# Altium footprint library WR-FPC_0.50mm.PcbLib: 147 footprints (part 7 of 10)
Each footprint in its own frame and in the unit in brackets; x right, y up, seen from the top. Pads: shape width x height; smd on the part's side, far side on the other; paste and mask are expansions set on the pad; w line width, h text height; cw(c..) or ccw(c..) is an arc to the next point about the centre after c.
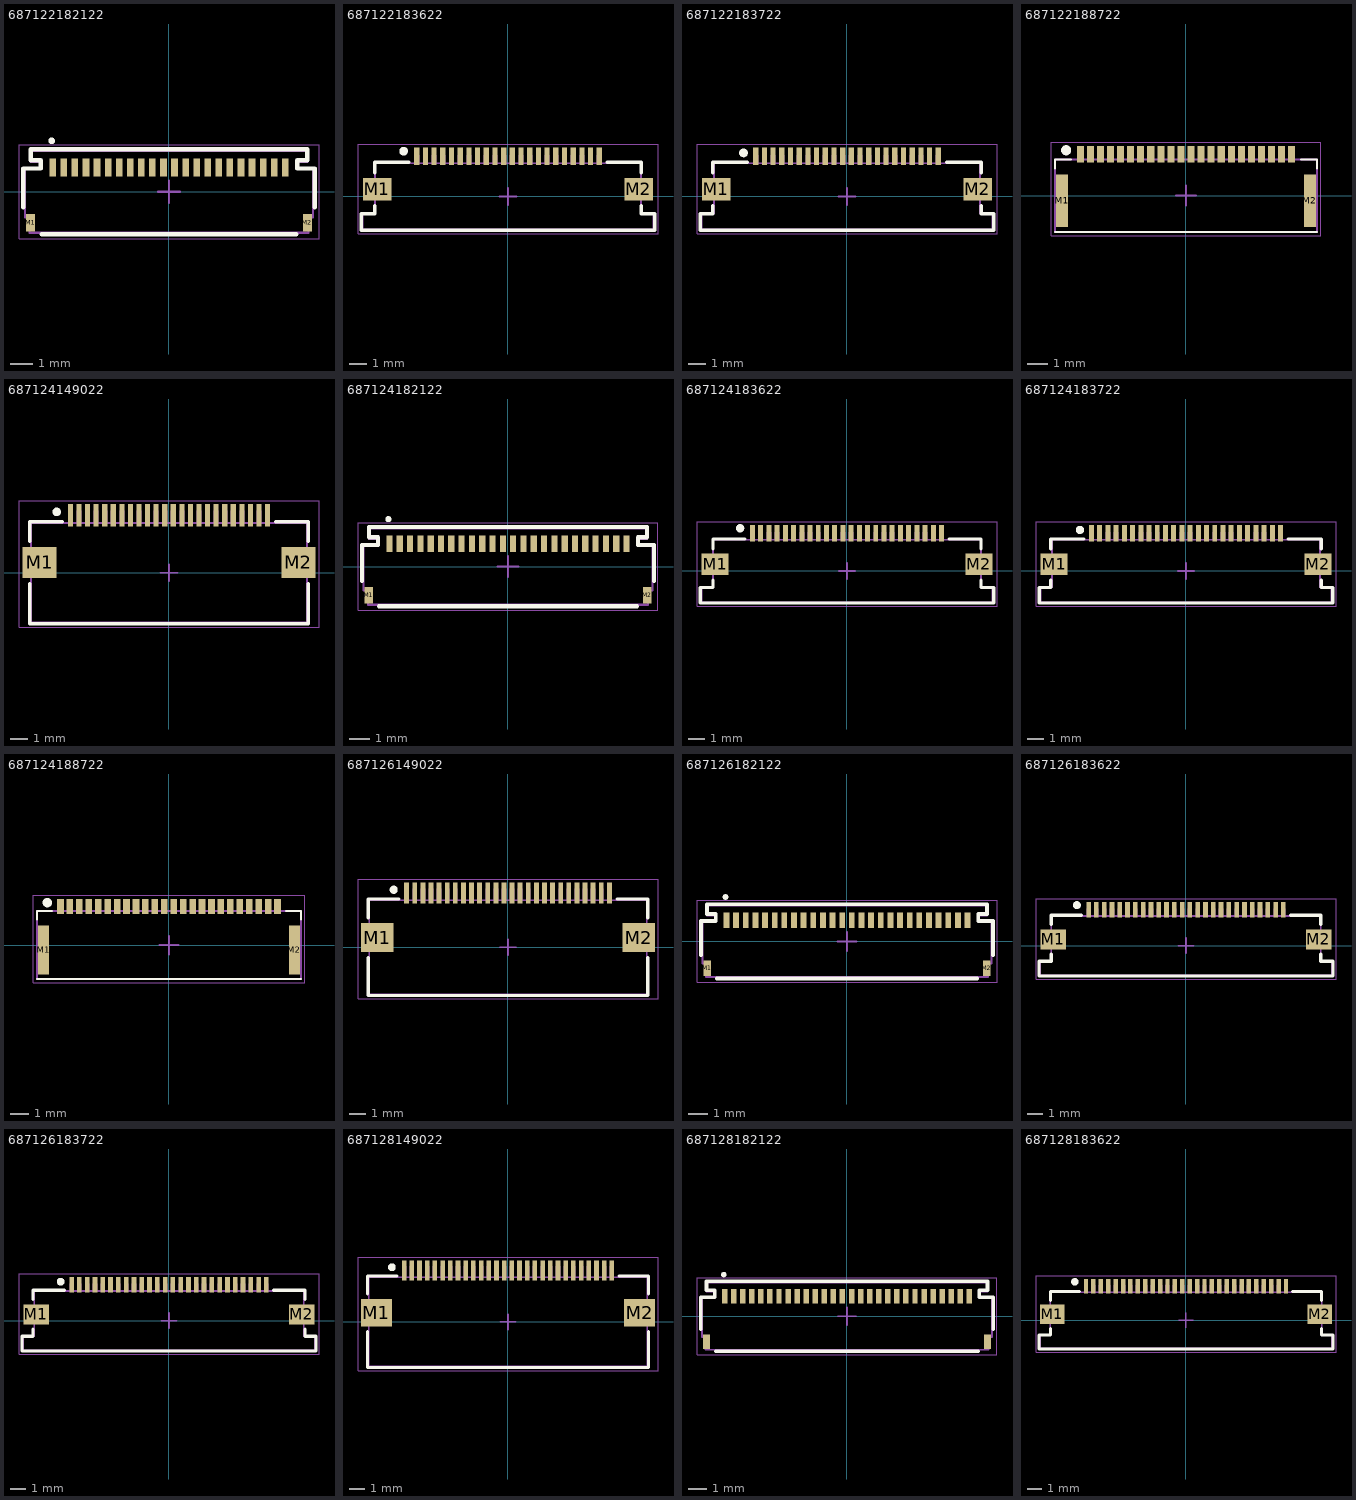
[diagram p6: the footprints below, top view; thin cyan lines are the x and y axes]

## 687122182122 [mm] "ZIF Connectors, Horizontal, Dual Contact Back Locking, pitch 0.5mm, 22p"
height 1.06
pads (24):
  rect 0.3x0.8 smd: 1(-5.25,1.1) 2(-4.75,1.1) 3(-4.25,1.1) 4(-3.75,1.1) 5(-3.25,1.1) 6(-2.75,1.1) 7(-2.25,1.1) 8(-1.75,1.1) 9(-1.25,1.1) 10(-0.75,1.1) 11(-0.25,1.1) 12(0.25,1.1) 13(0.75,1.1) 14(1.25,1.1) 15(1.75,1.1) 16(2.25,1.1) 17(2.75,1.1) 18(3.25,1.1) 19(3.75,1.1) 20(4.25,1.1) 21(4.75,1.1) 22(5.25,1.1)
  rect 0.4x0.8 smd: M1(-6.25,-1.4) M2(6.25,-1.4)
Top Overlay:
  circle w0.15: c-5.3,2.3 r0.075
  lines w0.2: -6.575,-0.7 -6.575,1.05 -5.8,1.05 -5.8,1.425 -6.25,1.425 -6.25,1.925 6.25,1.925 6.25,1.425 5.8,1.425 5.8,1.05 6.575,1.05 6.575,-0.7 ; -5.75,-1.925 5.75,-1.925
Top Assembly:
  lines w0.1: -6.5,-1.15 -6.5,1.05 -5.8,1.05 -5.8,1.35 -6.25,1.35 -6.25,1.85 6.25,1.85 6.25,1.35 5.8,1.35 5.8,1.05 6.5,1.05 6.5,-1.15 6.3,-1.15 6.3,-1.85 -6.3,-1.85 -6.3,-1.15 -6.5,-1.15
Top Designator:
  text ".Designator" at -3.647,-0.357 h1
Top 3D Body:
  lines w0.1: -6.5,-1.15 -6.3,-1.15 -6.3,-1.85 6.3,-1.85 6.3,-1.15 6.5,-1.15 6.5,1.05 5.8,1.05 5.8,1.35 6.25,1.35 6.25,1.85 -6.25,1.85 -6.25,1.35 -5.8,1.35 -5.8,1.05 -6.5,1.05 -6.5,-1.15
Top Courtyard:
  lines w0.05: -6.775,-2.125 -6.775,2.125 6.775,2.125 6.775,-2.125 -6.775,-2.125
Top Component Center:
  lines w0.1: -0.5,0 0.5,0 ; 0,-0.5 0,0.5
3D body "687122182122.stp": height 0.98, standoff -0.01, extent -6.5,-1.85 6.5,1.85

## 687122183622 [mm] "ZIF Connectors, Horizontal, Top Contact Low Profile, pitch 0.5mm, 22p"
height 1.3
pads (24):
  rect 0.3x1 smd: 1(-5.25,2.3) 2(-4.75,2.3) 3(-4.25,2.3) 4(-3.75,2.3) 5(-3.25,2.3) 6(-2.75,2.3) 7(-2.25,2.3) 8(-1.75,2.3) 9(-1.25,2.3) 10(-0.75,2.3) 11(-0.25,2.3) 12(0.25,2.3) 13(0.75,2.3) 14(1.25,2.3) 15(1.75,2.3) 16(2.25,2.3) 17(2.75,2.3) 18(3.25,2.3) 19(3.75,2.3) 20(4.25,2.3) 21(4.75,2.3) 22(5.25,2.3)
  rect 1.65x1.3 smd: M1(-7.525,0.4) M2(7.525,0.4)
Top Overlay:
  circle w0.25: c-6,2.6 r0.125
  lines w0.2: -7.65,-0.55 -7.65,-1 -8.425,-1 -8.425,-1.95 8.425,-1.95 8.425,-1 7.65,-1 7.65,-0.55 ; -7.65,1.35 -7.65,1.95 -5.7,1.95 ; 5.7,1.95 7.65,1.95 7.65,1.35
Top Assembly:
  lines w0.1: -5.35,1.9 -5.35,2.35 -5.15,2.35 -5.15,1.9 ; -4.85,1.9 -4.85,2.35 -4.65,2.35 -4.65,1.9 ; -4.35,1.9 -4.35,2.35 -4.15,2.35 -4.15,1.9 ; -3.85,1.9 -3.85,2.35 -3.65,2.35 -3.65,1.9 ; -3.35,1.9 -3.35,2.35 -3.15,2.35 -3.15,1.9 ; -2.85,1.9 -2.85,2.35 -2.65,2.35 -2.65,1.9 ; -2.35,1.9 -2.35,2.35 -2.15,2.35 -2.15,1.9 ; -1.85,1.9 -1.85,2.35 -1.65,2.35 -1.65,1.9 ; -1.35,1.9 -1.35,2.35 -1.15,2.35 -1.15,1.9 ; -0.85,1.9 -0.85,2.35 -0.65,2.35 -0.65,1.9 ; -0.35,1.9 -0.35,2.35 -0.15,2.35 -0.15,1.9 ; 0.15,1.9 0.15,2.35 0.35,2.35 0.35,1.9 ; 0.65,1.9 0.65,2.35 0.85,2.35 0.85,1.9 ; 1.15,1.9 1.15,2.35 1.35,2.35 1.35,1.9 ; 1.65,1.9 1.65,2.35 1.85,2.35 1.85,1.9 ; 2.15,1.9 2.15,2.35 2.35,2.35 2.35,1.9 ; 2.65,1.9 2.65,2.35 2.85,2.35 2.85,1.9 ; 3.15,1.9 3.15,2.35 3.35,2.35 3.35,1.9 ; 3.65,1.9 3.65,2.35 3.85,2.35 3.85,1.9 ; 4.15,1.9 4.15,2.35 4.35,2.35 4.35,1.9 ; 4.65,1.9 4.65,2.35 4.85,2.35 4.85,1.9 ; 5.15,1.9 5.15,2.35 5.35,2.35 5.35,1.9 ; -8.35,-1.9 8.35,-1.9 8.35,-1 7.65,-1 7.65,1.9 -7.65,1.9 -7.65,-1 -8.35,-1 -8.35,-1.9
Top Designator:
  text ".Designator" at -3.647,-0.357 h1
Top 3D Body:
  lines w0.1: -5.35,1.9 -5.35,2.35 -5.15,2.35 -5.15,1.9 ; -4.85,1.9 -4.85,2.35 -4.65,2.35 -4.65,1.9 ; -4.35,1.9 -4.35,2.35 -4.15,2.35 -4.15,1.9 ; -3.85,1.9 -3.85,2.35 -3.65,2.35 -3.65,1.9 ; -3.35,1.9 -3.35,2.35 -3.15,2.35 -3.15,1.9 ; -2.85,1.9 -2.85,2.35 -2.65,2.35 -2.65,1.9 ; -2.35,1.9 -2.35,2.35 -2.15,2.35 -2.15,1.9 ; -1.85,1.9 -1.85,2.35 -1.65,2.35 -1.65,1.9 ; -1.35,1.9 -1.35,2.35 -1.15,2.35 -1.15,1.9 ; -0.85,1.9 -0.85,2.35 -0.65,2.35 -0.65,1.9 ; -0.35,1.9 -0.35,2.35 -0.15,2.35 -0.15,1.9 ; 0.15,1.9 0.15,2.35 0.35,2.35 0.35,1.9 ; 0.65,1.9 0.65,2.35 0.85,2.35 0.85,1.9 ; 1.15,1.9 1.15,2.35 1.35,2.35 1.35,1.9 ; 1.65,1.9 1.65,2.35 1.85,2.35 1.85,1.9 ; 2.15,1.9 2.15,2.35 2.35,2.35 2.35,1.9 ; 2.65,1.9 2.65,2.35 2.85,2.35 2.85,1.9 ; 3.15,1.9 3.15,2.35 3.35,2.35 3.35,1.9 ; 3.65,1.9 3.65,2.35 3.85,2.35 3.85,1.9 ; 4.15,1.9 4.15,2.35 4.35,2.35 4.35,1.9 ; 4.65,1.9 4.65,2.35 4.85,2.35 4.85,1.9 ; 5.15,1.9 5.15,2.35 5.35,2.35 5.35,1.9 ; -8.35,-1.9 -8.35,-1 -7.65,-1 -7.65,1.9 7.65,1.9 7.65,-1 8.35,-1 8.35,-1.9 -8.35,-1.9
Top Courtyard:
  lines w0.05: -8.625,-2.15 8.625,-2.15 8.625,3 -8.625,3 -8.625,-2.15
Top Component Center:
  lines w0.1: -0.5,0 0.5,0 ; 0,-0.5 0,0.5
3D body "687122183622.stp": height 1.28, standoff -0.01, extent -8.35,-1.9 8.35,2.35

## 687122183722 [mm] "ZIF Connectors, Horizontal, Bottom Contact Low Profile, pitch 0.5mm, 22p"
height 1.3
pads (24):
  rect 0.3x1 smd: 1(-5.25,2.3) 2(-4.75,2.3) 3(-4.25,2.3) 4(-3.75,2.3) 5(-3.25,2.3) 6(-2.75,2.3) 7(-2.25,2.3) 8(-1.75,2.3) 9(-1.25,2.3) 10(-0.75,2.3) 11(-0.25,2.3) 12(0.25,2.3) 13(0.75,2.3) 14(1.25,2.3) 15(1.75,2.3) 16(2.25,2.3) 17(2.75,2.3) 18(3.25,2.3) 19(3.75,2.3) 20(4.25,2.3) 21(4.75,2.3) 22(5.25,2.3)
  rect 1.65x1.3 smd: M1(-7.525,0.4) M2(7.525,0.4)
Top Overlay:
  circle w0.25: c-5.95,2.5 r0.125
  lines w0.2: -7.725,-0.55 -7.725,-1 -8.425,-1 -8.425,-1.95 8.425,-1.95 8.425,-1 7.725,-1 7.725,-0.55 ; -7.725,1.35 -7.725,1.95 -5.725,1.95 ; 5.725,1.95 7.725,1.95 7.725,1.35
Top Assembly:
  lines w0.1: -5.35,1.9 -5.35,2.35 -5.15,2.35 -5.15,1.9 ; -4.85,1.9 -4.85,2.35 -4.65,2.35 -4.65,1.9 ; -4.35,1.9 -4.35,2.35 -4.15,2.35 -4.15,1.9 ; -3.85,1.9 -3.85,2.35 -3.65,2.35 -3.65,1.9 ; -3.35,1.9 -3.35,2.35 -3.15,2.35 -3.15,1.9 ; -2.85,1.9 -2.85,2.35 -2.65,2.35 -2.65,1.9 ; -2.35,1.9 -2.35,2.35 -2.15,2.35 -2.15,1.9 ; -1.85,1.9 -1.85,2.35 -1.65,2.35 -1.65,1.9 ; -1.35,1.9 -1.35,2.35 -1.15,2.35 -1.15,1.9 ; -0.85,1.9 -0.85,2.35 -0.65,2.35 -0.65,1.9 ; -0.35,1.9 -0.35,2.35 -0.15,2.35 -0.15,1.9 ; 0.15,1.9 0.15,2.35 0.35,2.35 0.35,1.9 ; 0.65,1.9 0.65,2.35 0.85,2.35 0.85,1.9 ; 1.15,1.9 1.15,2.35 1.35,2.35 1.35,1.9 ; 1.65,1.9 1.65,2.35 1.85,2.35 1.85,1.9 ; 2.15,1.9 2.15,2.35 2.35,2.35 2.35,1.9 ; 2.65,1.9 2.65,2.35 2.85,2.35 2.85,1.9 ; 3.15,1.9 3.15,2.35 3.35,2.35 3.35,1.9 ; 3.65,1.9 3.65,2.35 3.85,2.35 3.85,1.9 ; 4.15,1.9 4.15,2.35 4.35,2.35 4.35,1.9 ; 4.65,1.9 4.65,2.35 4.85,2.35 4.85,1.9 ; 5.15,1.9 5.15,2.35 5.35,2.35 5.35,1.9 ; -8.35,-1.9 -8.35,-1 -7.65,-1 -7.65,1.9 7.65,1.9 7.65,-1 8.35,-1 8.35,-1.9 -8.35,-1.9
Top Designator:
  text ".Designator" at -3.647,-0.357 h1
Top 3D Body:
  lines w0.1: -5.35,1.9 -5.35,2.35 -5.15,2.35 -5.15,1.9 ; -4.85,1.9 -4.85,2.35 -4.65,2.35 -4.65,1.9 ; -4.35,1.9 -4.35,2.35 -4.15,2.35 -4.15,1.9 ; -3.85,1.9 -3.85,2.35 -3.65,2.35 -3.65,1.9 ; -3.35,1.9 -3.35,2.35 -3.15,2.35 -3.15,1.9 ; -2.85,1.9 -2.85,2.35 -2.65,2.35 -2.65,1.9 ; -2.35,1.9 -2.35,2.35 -2.15,2.35 -2.15,1.9 ; -1.85,1.9 -1.85,2.35 -1.65,2.35 -1.65,1.9 ; -1.35,1.9 -1.35,2.35 -1.15,2.35 -1.15,1.9 ; -0.85,1.9 -0.85,2.35 -0.65,2.35 -0.65,1.9 ; -0.35,1.9 -0.35,2.35 -0.15,2.35 -0.15,1.9 ; 0.15,1.9 0.15,2.35 0.35,2.35 0.35,1.9 ; 0.65,1.9 0.65,2.35 0.85,2.35 0.85,1.9 ; 1.15,1.9 1.15,2.35 1.35,2.35 1.35,1.9 ; 1.65,1.9 1.65,2.35 1.85,2.35 1.85,1.9 ; 2.15,1.9 2.15,2.35 2.35,2.35 2.35,1.9 ; 2.65,1.9 2.65,2.35 2.85,2.35 2.85,1.9 ; 3.15,1.9 3.15,2.35 3.35,2.35 3.35,1.9 ; 3.65,1.9 3.65,2.35 3.85,2.35 3.85,1.9 ; 4.15,1.9 4.15,2.35 4.35,2.35 4.35,1.9 ; 4.65,1.9 4.65,2.35 4.85,2.35 4.85,1.9 ; 5.15,1.9 5.15,2.35 5.35,2.35 5.35,1.9 ; -8.35,-1.9 8.35,-1.9 8.35,-1 7.65,-1 7.65,1.9 -7.65,1.9 -7.65,-1 -8.35,-1 -8.35,-1.9
Top Courtyard:
  lines w0.05: -8.625,-2.15 -8.625,3 8.625,3 8.625,-2.15 -8.625,-2.15
Top Component Center:
  lines w0.1: -0.5,0 0.5,0 ; 0,-0.5 0,0.5
3D body "687122183722.stp": height 1.28, standoff -0.01, extent -8.35,-1.9 8.35,2.35

## 687122188722 [mm] "0.5 mm LIF Horizontal FFC Connector, 22pins"
height 1.2
pads (24):
  rect 0.35x0.8 smd: 1(-5.25,2.05) 2(-4.75,2.05) 3(-4.25,2.05) 4(-3.75,2.05) 5(-3.25,2.05) 6(-2.75,2.05) 7(-2.25,2.05) 8(-1.75,2.05) 9(-1.25,2.05) 10(-0.75,2.05) 11(-0.25,2.05) 12(0.25,2.05) 13(0.75,2.05) 14(1.25,2.05) 15(1.75,2.05) 16(2.25,2.05) 17(2.75,2.05) 18(3.25,2.05) 19(3.75,2.05) 20(4.25,2.05) 21(4.75,2.05) 22(5.25,2.05)
  rect 0.6x2.6 smd: M1(-6.15,-0.25) M2(6.15,-0.25)
Top Overlay:
  circle w0.25: c-5.95,2.25 r0.125
  lines w0.1: -6.5,-1.8 6.5,-1.8 ; -6.5,1.35 -6.5,1.8 -5.7,1.8 ; 5.7,1.8 6.5,1.8 6.5,1.35
Top Assembly:
  lines w0.1: -5.35,1.8 -5.35,2.3 -5.15,2.3 -5.15,1.8 ; -4.85,1.8 -4.85,2.3 -4.65,2.3 -4.65,1.8 ; -4.35,1.8 -4.35,2.3 -4.15,2.3 -4.15,1.8 ; -3.85,1.8 -3.85,2.3 -3.65,2.3 -3.65,1.8 ; -3.35,1.8 -3.35,2.3 -3.15,2.3 -3.15,1.8 ; -2.85,1.8 -2.85,2.3 -2.65,2.3 -2.65,1.8 ; -2.35,1.8 -2.35,2.3 -2.15,2.3 -2.15,1.8 ; -1.85,1.8 -1.85,2.3 -1.65,2.3 -1.65,1.8 ; -1.35,1.8 -1.35,2.3 -1.15,2.3 -1.15,1.8 ; -0.85,1.8 -0.85,2.3 -0.65,2.3 -0.65,1.8 ; -0.35,1.8 -0.35,2.3 -0.15,2.3 -0.15,1.8 ; 0.15,1.8 0.15,2.3 0.35,2.3 0.35,1.8 ; 0.65,1.8 0.65,2.3 0.85,2.3 0.85,1.8 ; 1.15,1.8 1.15,2.3 1.35,2.3 1.35,1.8 ; 1.65,1.8 1.65,2.3 1.85,2.3 1.85,1.8 ; 2.15,1.8 2.15,2.3 2.35,2.3 2.35,1.8 ; 2.65,1.8 2.65,2.3 2.85,2.3 2.85,1.8 ; 3.15,1.8 3.15,2.3 3.35,2.3 3.35,1.8 ; 3.65,1.8 3.65,2.3 3.85,2.3 3.85,1.8 ; 4.15,1.8 4.15,2.3 4.35,2.3 4.35,1.8 ; 4.65,1.8 4.65,2.3 4.85,2.3 4.85,1.8 ; 5.15,1.8 5.15,2.3 5.35,2.3 5.35,1.8 ; -6.5,-1.8 -6.5,1.8 6.5,1.8 6.5,-1.8 -6.5,-1.8
Top Designator:
  text ".Designator" at -3.647,-0.357 h1
Top 3D Body:
  lines w0.1: -5.35,1.8 -5.35,2.3 -5.15,2.3 -5.15,1.8 ; -4.85,1.8 -4.85,2.3 -4.65,2.3 -4.65,1.8 ; -4.35,1.8 -4.35,2.3 -4.15,2.3 -4.15,1.8 ; -3.85,1.8 -3.85,2.3 -3.65,2.3 -3.65,1.8 ; -3.35,1.8 -3.35,2.3 -3.15,2.3 -3.15,1.8 ; -2.85,1.8 -2.85,2.3 -2.65,2.3 -2.65,1.8 ; -2.35,1.8 -2.35,2.3 -2.15,2.3 -2.15,1.8 ; -1.85,1.8 -1.85,2.3 -1.65,2.3 -1.65,1.8 ; -1.35,1.8 -1.35,2.3 -1.15,2.3 -1.15,1.8 ; -0.85,1.8 -0.85,2.3 -0.65,2.3 -0.65,1.8 ; -0.35,1.8 -0.35,2.3 -0.15,2.3 -0.15,1.8 ; 0.15,1.8 0.15,2.3 0.35,2.3 0.35,1.8 ; 0.65,1.8 0.65,2.3 0.85,2.3 0.85,1.8 ; 1.15,1.8 1.15,2.3 1.35,2.3 1.35,1.8 ; 1.65,1.8 1.65,2.3 1.85,2.3 1.85,1.8 ; 2.15,1.8 2.15,2.3 2.35,2.3 2.35,1.8 ; 2.65,1.8 2.65,2.3 2.85,2.3 2.85,1.8 ; 3.15,1.8 3.15,2.3 3.35,2.3 3.35,1.8 ; 3.65,1.8 3.65,2.3 3.85,2.3 3.85,1.8 ; 4.15,1.8 4.15,2.3 4.35,2.3 4.35,1.8 ; 4.65,1.8 4.65,2.3 4.85,2.3 4.85,1.8 ; 5.15,1.8 5.15,2.3 5.35,2.3 5.35,1.8 ; -6.5,-1.8 6.5,-1.8 6.5,1.8 -6.5,1.8 -6.5,-1.8
Top Courtyard:
  lines w0.05: -6.7,-2 -6.7,2.65 6.7,2.65 6.7,-2 -6.7,-2
Top Component Center:
  lines w0.1: -0.5,0 0.5,0 ; 0,-0.5 0,0.5
3D body "687122188722.stp": height 1.2, standoff 0, extent -6.5,-1.8 6.5,2.3

## 687124149022 [mm] "0.50mm SMT ZIF Horizontal Hinge Type Bottom Contact, 24p"
height 2.3
pads (26):
  rect 0.3x1.3 smd: 1(-5.75,3.35) 2(-5.25,3.35) 3(-4.75,3.35) 4(-4.25,3.35) 5(-3.75,3.35) 6(-3.25,3.35) 7(-2.75,3.35) 8(-2.25,3.35) 9(-1.75,3.35) 10(-1.25,3.35) 11(-0.75,3.35) 12(-0.25,3.35) 13(0.25,3.35) 14(0.75,3.35) 15(1.25,3.35) 16(1.75,3.35) 17(2.25,3.35) 18(2.75,3.35) 19(3.25,3.35) 20(3.75,3.35) 21(4.25,3.35) 22(4.75,3.35) 23(5.25,3.35) 24(5.75,3.35)
  rect 2x1.8 smd: M1(-7.55,0.6) M2(7.55,0.6)
Top Overlay:
  circle w0.25: c-6.55,3.55 r0.125
  lines w0.2: -8.125,-0.625 -8.125,-2.975 8.125,-2.975 8.125,-0.625 ; -8.125,1.825 -8.125,2.975 -6.225,2.975 ; 6.225,2.975 8.125,2.975 8.125,1.825
Top Assembly:
  lines w0.1: -5.85,2.9 -5.85,3.6 -5.65,3.6 -5.65,2.9 ; -5.35,2.9 -5.35,3.6 -5.15,3.6 -5.15,2.9 ; -4.85,2.9 -4.85,3.6 -4.65,3.6 -4.65,2.9 ; -4.35,2.9 -4.35,3.6 -4.15,3.6 -4.15,2.9 ; -3.85,2.9 -3.85,3.6 -3.65,3.6 -3.65,2.9 ; -3.35,2.9 -3.35,3.6 -3.15,3.6 -3.15,2.9 ; -2.85,2.9 -2.85,3.6 -2.65,3.6 -2.65,2.9 ; -2.35,2.9 -2.35,3.6 -2.15,3.6 -2.15,2.9 ; -1.85,2.9 -1.85,3.6 -1.65,3.6 -1.65,2.9 ; -1.35,2.9 -1.35,3.6 -1.15,3.6 -1.15,2.9 ; -0.85,2.9 -0.85,3.6 -0.65,3.6 -0.65,2.9 ; -0.35,2.9 -0.35,3.6 -0.15,3.6 -0.15,2.9 ; 0.15,2.9 0.15,3.6 0.35,3.6 0.35,2.9 ; 0.65,2.9 0.65,3.6 0.85,3.6 0.85,2.9 ; 1.15,2.9 1.15,3.6 1.35,3.6 1.35,2.9 ; 1.65,2.9 1.65,3.6 1.85,3.6 1.85,2.9 ; 2.15,2.9 2.15,3.6 2.35,3.6 2.35,2.9 ; 2.65,2.9 2.65,3.6 2.85,3.6 2.85,2.9 ; 3.15,2.9 3.15,3.6 3.35,3.6 3.35,2.9 ; 3.65,2.9 3.65,3.6 3.85,3.6 3.85,2.9 ; 4.15,2.9 4.15,3.6 4.35,3.6 4.35,2.9 ; 4.65,2.9 4.65,3.6 4.85,3.6 4.85,2.9 ; 5.15,2.9 5.15,3.6 5.35,3.6 5.35,2.9 ; 5.65,2.9 5.65,3.6 5.85,3.6 5.85,2.9 ; -8.05,-2.9 -8.05,2.9 8.05,2.9 8.05,-2.9 -8.05,-2.9
Top Designator:
  text ".Designator" at -3.647,-0.357 h1
Top 3D Body:
  lines w0.1: -5.85,2.9 -5.85,3.6 -5.65,3.6 -5.65,2.9 ; -5.35,2.9 -5.35,3.6 -5.15,3.6 -5.15,2.9 ; -4.85,2.9 -4.85,3.6 -4.65,3.6 -4.65,2.9 ; -4.35,2.9 -4.35,3.6 -4.15,3.6 -4.15,2.9 ; -3.85,2.9 -3.85,3.6 -3.65,3.6 -3.65,2.9 ; -3.35,2.9 -3.35,3.6 -3.15,3.6 -3.15,2.9 ; -2.85,2.9 -2.85,3.6 -2.65,3.6 -2.65,2.9 ; -2.35,2.9 -2.35,3.6 -2.15,3.6 -2.15,2.9 ; -1.85,2.9 -1.85,3.6 -1.65,3.6 -1.65,2.9 ; -1.35,2.9 -1.35,3.6 -1.15,3.6 -1.15,2.9 ; -0.85,2.9 -0.85,3.6 -0.65,3.6 -0.65,2.9 ; -0.35,2.9 -0.35,3.6 -0.15,3.6 -0.15,2.9 ; 0.15,2.9 0.15,3.6 0.35,3.6 0.35,2.9 ; 0.65,2.9 0.65,3.6 0.85,3.6 0.85,2.9 ; 1.15,2.9 1.15,3.6 1.35,3.6 1.35,2.9 ; 1.65,2.9 1.65,3.6 1.85,3.6 1.85,2.9 ; 2.15,2.9 2.15,3.6 2.35,3.6 2.35,2.9 ; 2.65,2.9 2.65,3.6 2.85,3.6 2.85,2.9 ; 3.15,2.9 3.15,3.6 3.35,3.6 3.35,2.9 ; 3.65,2.9 3.65,3.6 3.85,3.6 3.85,2.9 ; 4.15,2.9 4.15,3.6 4.35,3.6 4.35,2.9 ; 4.65,2.9 4.65,3.6 4.85,3.6 4.85,2.9 ; 5.15,2.9 5.15,3.6 5.35,3.6 5.35,2.9 ; 5.65,2.9 5.65,3.6 5.85,3.6 5.85,2.9 ; -8.05,-2.9 8.05,-2.9 8.05,2.9 -8.05,2.9 -8.05,-2.9
Top Courtyard:
  lines w0.05: -8.75,-3.175 -8.75,4.2 8.75,4.2 8.75,-3.175 -8.75,-3.175
Top Component Center:
  lines w0.1: -0.5,0 0.5,0 ; 0,-0.5 0,0.5
3D body "687124149022.stp": height 2.25, standoff 0, extent -8.05,-2.9 8.05,3.6

## 687124182122 [mm] "ZIF Connectors, Horizontal, Dual Contact Back Locking, pitch 0.5mm, 24p"
height 1.06
pads (26):
  rect 0.3x0.8 smd: 1(-5.75,1.1) 2(-5.25,1.1) 3(-4.75,1.1) 4(-4.25,1.1) 5(-3.75,1.1) 6(-3.25,1.1) 7(-2.75,1.1) 8(-2.25,1.1) 9(-1.75,1.1) 10(-1.25,1.1) 11(-0.75,1.1) 12(-0.25,1.1) 13(0.25,1.1) 14(0.75,1.1) 15(1.25,1.1) 16(1.75,1.1) 17(2.25,1.1) 18(2.75,1.1) 19(3.25,1.1) 20(3.75,1.1) 21(4.25,1.1) 22(4.75,1.1) 23(5.25,1.1) 24(5.75,1.1)
  rect 0.4x0.8 smd: M1(-6.75,-1.4) M2(6.75,-1.4)
Top Overlay:
  circle w0.15: c-5.8,2.3 r0.075
  lines w0.2: -7.075,-0.7 -7.075,1.05 -6.3,1.05 -6.3,1.425 -6.75,1.425 -6.75,1.925 6.75,1.925 6.75,1.425 6.3,1.425 6.3,1.05 7.075,1.05 7.075,-0.7 ; -6.25,-1.925 6.25,-1.925
Top Assembly:
  lines w0.1: -7,-1.15 -6.8,-1.15 -6.8,-1.85 6.8,-1.85 6.8,-1.15 7,-1.15 7,1.05 6.3,1.05 6.3,1.35 6.75,1.35 6.75,1.85 -6.75,1.85 -6.75,1.35 -6.3,1.35 -6.3,1.05 -7,1.05 -7,-1.15
Top Designator:
  text ".Designator" at -3.647,-0.357 h1
Top 3D Body:
  lines w0.1: -7,-1.15 -7,1.05 -6.3,1.05 -6.3,1.35 -6.75,1.35 -6.75,1.85 6.75,1.85 6.75,1.35 6.3,1.35 6.3,1.05 7,1.05 7,-1.15 6.8,-1.15 6.8,-1.85 -6.8,-1.85 -6.8,-1.15 -7,-1.15
Top Courtyard:
  lines w0.05: -7.275,-2.125 7.275,-2.125 7.275,2.125 -7.275,2.125 -7.275,-2.125
Top Component Center:
  lines w0.1: -0.5,0 0.5,0 ; 0,-0.5 0,0.5
3D body "687124182122.stp": height 0.98, standoff -0.01, extent -7,-1.85 7,1.85

## 687124183622 [mm] "ZIF Connectors, Horizontal, Top Contact Low Profile, pitch 0.5mm, 24p"
height 1.3
pads (26):
  rect 0.3x1 smd: 1(-5.75,2.3) 2(-5.25,2.3) 3(-4.75,2.3) 4(-4.25,2.3) 5(-3.75,2.3) 6(-3.25,2.3) 7(-2.75,2.3) 8(-2.25,2.3) 9(-1.75,2.3) 10(-1.25,2.3) 11(-0.75,2.3) 12(-0.25,2.3) 13(0.25,2.3) 14(0.75,2.3) 15(1.25,2.3) 16(1.75,2.3) 17(2.25,2.3) 18(2.75,2.3) 19(3.25,2.3) 20(3.75,2.3) 21(4.25,2.3) 22(4.75,2.3) 23(5.25,2.3) 24(5.75,2.3)
  rect 1.65x1.3 smd: M1(-8.025,0.4) M2(8.025,0.4)
Top Overlay:
  circle w0.25: c-6.5,2.6 r0.125
  lines w0.2: -8.15,-0.55 -8.15,-1 -8.925,-1 -8.925,-1.95 8.925,-1.95 8.925,-1 8.15,-1 8.15,-0.55 ; -8.15,1.35 -8.15,1.95 -6.2,1.95 ; 6.2,1.95 8.15,1.95 8.15,1.35
Top Assembly:
  lines w0.1: -5.85,1.9 -5.85,2.35 -5.65,2.35 -5.65,1.9 ; -5.35,1.9 -5.35,2.35 -5.15,2.35 -5.15,1.9 ; -4.85,1.9 -4.85,2.35 -4.65,2.35 -4.65,1.9 ; -4.35,1.9 -4.35,2.35 -4.15,2.35 -4.15,1.9 ; -3.85,1.9 -3.85,2.35 -3.65,2.35 -3.65,1.9 ; -3.35,1.9 -3.35,2.35 -3.15,2.35 -3.15,1.9 ; -2.85,1.9 -2.85,2.35 -2.65,2.35 -2.65,1.9 ; -2.35,1.9 -2.35,2.35 -2.15,2.35 -2.15,1.9 ; -1.85,1.9 -1.85,2.35 -1.65,2.35 -1.65,1.9 ; -1.35,1.9 -1.35,2.35 -1.15,2.35 -1.15,1.9 ; -0.85,1.9 -0.85,2.35 -0.65,2.35 -0.65,1.9 ; -0.35,1.9 -0.35,2.35 -0.15,2.35 -0.15,1.9 ; 0.15,1.9 0.15,2.35 0.35,2.35 0.35,1.9 ; 0.65,1.9 0.65,2.35 0.85,2.35 0.85,1.9 ; 1.15,1.9 1.15,2.35 1.35,2.35 1.35,1.9 ; 1.65,1.9 1.65,2.35 1.85,2.35 1.85,1.9 ; 2.15,1.9 2.15,2.35 2.35,2.35 2.35,1.9 ; 2.65,1.9 2.65,2.35 2.85,2.35 2.85,1.9 ; 3.15,1.9 3.15,2.35 3.35,2.35 3.35,1.9 ; 3.65,1.9 3.65,2.35 3.85,2.35 3.85,1.9 ; 4.15,1.9 4.15,2.35 4.35,2.35 4.35,1.9 ; 4.65,1.9 4.65,2.35 4.85,2.35 4.85,1.9 ; 5.15,1.9 5.15,2.35 5.35,2.35 5.35,1.9 ; 5.65,1.9 5.65,2.35 5.85,2.35 5.85,1.9 ; -8.85,-1.9 8.85,-1.9 8.85,-1 8.15,-1 8.15,1.9 -8.15,1.9 -8.15,-1 -8.85,-1 -8.85,-1.9
Top Designator:
  text ".Designator" at -3.647,-0.357 h1
Top 3D Body:
  lines w0.1: -5.85,1.9 -5.85,2.35 -5.65,2.35 -5.65,1.9 ; -5.35,1.9 -5.35,2.35 -5.15,2.35 -5.15,1.9 ; -4.85,1.9 -4.85,2.35 -4.65,2.35 -4.65,1.9 ; -4.35,1.9 -4.35,2.35 -4.15,2.35 -4.15,1.9 ; -3.85,1.9 -3.85,2.35 -3.65,2.35 -3.65,1.9 ; -3.35,1.9 -3.35,2.35 -3.15,2.35 -3.15,1.9 ; -2.85,1.9 -2.85,2.35 -2.65,2.35 -2.65,1.9 ; -2.35,1.9 -2.35,2.35 -2.15,2.35 -2.15,1.9 ; -1.85,1.9 -1.85,2.35 -1.65,2.35 -1.65,1.9 ; -1.35,1.9 -1.35,2.35 -1.15,2.35 -1.15,1.9 ; -0.85,1.9 -0.85,2.35 -0.65,2.35 -0.65,1.9 ; -0.35,1.9 -0.35,2.35 -0.15,2.35 -0.15,1.9 ; 0.15,1.9 0.15,2.35 0.35,2.35 0.35,1.9 ; 0.65,1.9 0.65,2.35 0.85,2.35 0.85,1.9 ; 1.15,1.9 1.15,2.35 1.35,2.35 1.35,1.9 ; 1.65,1.9 1.65,2.35 1.85,2.35 1.85,1.9 ; 2.15,1.9 2.15,2.35 2.35,2.35 2.35,1.9 ; 2.65,1.9 2.65,2.35 2.85,2.35 2.85,1.9 ; 3.15,1.9 3.15,2.35 3.35,2.35 3.35,1.9 ; 3.65,1.9 3.65,2.35 3.85,2.35 3.85,1.9 ; 4.15,1.9 4.15,2.35 4.35,2.35 4.35,1.9 ; 4.65,1.9 4.65,2.35 4.85,2.35 4.85,1.9 ; 5.15,1.9 5.15,2.35 5.35,2.35 5.35,1.9 ; 5.65,1.9 5.65,2.35 5.85,2.35 5.85,1.9 ; -8.85,-1.9 -8.85,-1 -8.15,-1 -8.15,1.9 8.15,1.9 8.15,-1 8.85,-1 8.85,-1.9 -8.85,-1.9
Top Courtyard:
  lines w0.05: -9.125,-2.15 9.125,-2.15 9.125,3 -9.125,3 -9.125,-2.15
Top Component Center:
  lines w0.1: -0.5,0 0.5,0 ; 0,-0.5 0,0.5
3D body "687124183622.stp": height 1.28, standoff -0.01, extent -8.85,-1.9 8.85,2.35

## 687124183722 [mm] "ZIF Connectors, Horizontal, Bottom Contact Low Profile, pitch 0.5mm, 24p"
height 1.3
pads (26):
  rect 0.3x1 smd: 1(-5.75,2.3) 2(-5.25,2.3) 3(-4.75,2.3) 4(-4.25,2.3) 5(-3.75,2.3) 6(-3.25,2.3) 7(-2.75,2.3) 8(-2.25,2.3) 9(-1.75,2.3) 10(-1.25,2.3) 11(-0.75,2.3) 12(-0.25,2.3) 13(0.25,2.3) 14(0.75,2.3) 15(1.25,2.3) 16(1.75,2.3) 17(2.25,2.3) 18(2.75,2.3) 19(3.25,2.3) 20(3.75,2.3) 21(4.25,2.3) 22(4.75,2.3) 23(5.25,2.3) 24(5.75,2.3)
  rect 1.65x1.3 smd: M1(-8.025,0.4) M2(8.025,0.4)
Top Overlay:
  circle w0.25: c-6.45,2.5 r0.125
  lines w0.2: -8.225,-0.55 -8.225,-1 -8.925,-1 -8.925,-1.95 8.925,-1.95 8.925,-1 8.225,-1 8.225,-0.55 ; -8.225,1.35 -8.225,1.95 -6.225,1.95 ; 6.225,1.95 8.225,1.95 8.225,1.35
Top Assembly:
  lines w0.1: -5.85,1.9 -5.85,2.35 -5.65,2.35 -5.65,1.9 ; -5.35,1.9 -5.35,2.35 -5.15,2.35 -5.15,1.9 ; -4.85,1.9 -4.85,2.35 -4.65,2.35 -4.65,1.9 ; -4.35,1.9 -4.35,2.35 -4.15,2.35 -4.15,1.9 ; -3.85,1.9 -3.85,2.35 -3.65,2.35 -3.65,1.9 ; -3.35,1.9 -3.35,2.35 -3.15,2.35 -3.15,1.9 ; -2.85,1.9 -2.85,2.35 -2.65,2.35 -2.65,1.9 ; -2.35,1.9 -2.35,2.35 -2.15,2.35 -2.15,1.9 ; -1.85,1.9 -1.85,2.35 -1.65,2.35 -1.65,1.9 ; -1.35,1.9 -1.35,2.35 -1.15,2.35 -1.15,1.9 ; -0.85,1.9 -0.85,2.35 -0.65,2.35 -0.65,1.9 ; -0.35,1.9 -0.35,2.35 -0.15,2.35 -0.15,1.9 ; 0.15,1.9 0.15,2.35 0.35,2.35 0.35,1.9 ; 0.65,1.9 0.65,2.35 0.85,2.35 0.85,1.9 ; 1.15,1.9 1.15,2.35 1.35,2.35 1.35,1.9 ; 1.65,1.9 1.65,2.35 1.85,2.35 1.85,1.9 ; 2.15,1.9 2.15,2.35 2.35,2.35 2.35,1.9 ; 2.65,1.9 2.65,2.35 2.85,2.35 2.85,1.9 ; 3.15,1.9 3.15,2.35 3.35,2.35 3.35,1.9 ; 3.65,1.9 3.65,2.35 3.85,2.35 3.85,1.9 ; 4.15,1.9 4.15,2.35 4.35,2.35 4.35,1.9 ; 4.65,1.9 4.65,2.35 4.85,2.35 4.85,1.9 ; 5.15,1.9 5.15,2.35 5.35,2.35 5.35,1.9 ; 5.65,1.9 5.65,2.35 5.85,2.35 5.85,1.9 ; -8.85,-1.9 -8.85,-1 -8.15,-1 -8.15,1.9 8.15,1.9 8.15,-1 8.85,-1 8.85,-1.9 -8.85,-1.9
Top Designator:
  text ".Designator" at -3.647,-0.357 h1
Top 3D Body:
  lines w0.1: -5.85,1.9 -5.85,2.35 -5.65,2.35 -5.65,1.9 ; -5.35,1.9 -5.35,2.35 -5.15,2.35 -5.15,1.9 ; -4.85,1.9 -4.85,2.35 -4.65,2.35 -4.65,1.9 ; -4.35,1.9 -4.35,2.35 -4.15,2.35 -4.15,1.9 ; -3.85,1.9 -3.85,2.35 -3.65,2.35 -3.65,1.9 ; -3.35,1.9 -3.35,2.35 -3.15,2.35 -3.15,1.9 ; -2.85,1.9 -2.85,2.35 -2.65,2.35 -2.65,1.9 ; -2.35,1.9 -2.35,2.35 -2.15,2.35 -2.15,1.9 ; -1.85,1.9 -1.85,2.35 -1.65,2.35 -1.65,1.9 ; -1.35,1.9 -1.35,2.35 -1.15,2.35 -1.15,1.9 ; -0.85,1.9 -0.85,2.35 -0.65,2.35 -0.65,1.9 ; -0.35,1.9 -0.35,2.35 -0.15,2.35 -0.15,1.9 ; 0.15,1.9 0.15,2.35 0.35,2.35 0.35,1.9 ; 0.65,1.9 0.65,2.35 0.85,2.35 0.85,1.9 ; 1.15,1.9 1.15,2.35 1.35,2.35 1.35,1.9 ; 1.65,1.9 1.65,2.35 1.85,2.35 1.85,1.9 ; 2.15,1.9 2.15,2.35 2.35,2.35 2.35,1.9 ; 2.65,1.9 2.65,2.35 2.85,2.35 2.85,1.9 ; 3.15,1.9 3.15,2.35 3.35,2.35 3.35,1.9 ; 3.65,1.9 3.65,2.35 3.85,2.35 3.85,1.9 ; 4.15,1.9 4.15,2.35 4.35,2.35 4.35,1.9 ; 4.65,1.9 4.65,2.35 4.85,2.35 4.85,1.9 ; 5.15,1.9 5.15,2.35 5.35,2.35 5.35,1.9 ; 5.65,1.9 5.65,2.35 5.85,2.35 5.85,1.9 ; -8.85,-1.9 8.85,-1.9 8.85,-1 8.15,-1 8.15,1.9 -8.15,1.9 -8.15,-1 -8.85,-1 -8.85,-1.9
Top Courtyard:
  lines w0.05: -9.125,-2.15 -9.125,3 9.125,3 9.125,-2.15 -9.125,-2.15
Top Component Center:
  lines w0.1: -0.5,0 0.5,0 ; 0,-0.5 0,0.5
3D body "687124183722.stp": height 1.28, standoff -0.01, extent -8.85,-1.9 8.85,2.35

## 687124188722 [mm] "0.5 mm LIF Horizontal FFC Connector, 24pins"
height 1.2
pads (26):
  rect 0.35x0.8 smd: 1(-5.75,2.05) 2(-5.25,2.05) 3(-4.75,2.05) 4(-4.25,2.05) 5(-3.75,2.05) 6(-3.25,2.05) 7(-2.75,2.05) 8(-2.25,2.05) 9(-1.75,2.05) 10(-1.25,2.05) 11(-0.75,2.05) 12(-0.25,2.05) 13(0.25,2.05) 14(0.75,2.05) 15(1.25,2.05) 16(1.75,2.05) 17(2.25,2.05) 18(2.75,2.05) 19(3.25,2.05) 20(3.75,2.05) 21(4.25,2.05) 22(4.75,2.05) 23(5.25,2.05) 24(5.75,2.05)
  rect 0.6x2.6 smd: M1(-6.65,-0.25) M2(6.65,-0.25)
Top Overlay:
  circle w0.25: c-6.45,2.25 r0.125
  lines w0.1: -7,-1.8 7,-1.8 ; -7,1.35 -7,1.8 -6.2,1.8 ; 6.2,1.8 7,1.8 7,1.35
Top Assembly:
  lines w0.1: -5.85,1.8 -5.85,2.3 -5.65,2.3 -5.65,1.8 ; -5.35,1.8 -5.35,2.3 -5.15,2.3 -5.15,1.8 ; -4.85,1.8 -4.85,2.3 -4.65,2.3 -4.65,1.8 ; -4.35,1.8 -4.35,2.3 -4.15,2.3 -4.15,1.8 ; -3.85,1.8 -3.85,2.3 -3.65,2.3 -3.65,1.8 ; -3.35,1.8 -3.35,2.3 -3.15,2.3 -3.15,1.8 ; -2.85,1.8 -2.85,2.3 -2.65,2.3 -2.65,1.8 ; -2.35,1.8 -2.35,2.3 -2.15,2.3 -2.15,1.8 ; -1.85,1.8 -1.85,2.3 -1.65,2.3 -1.65,1.8 ; -1.35,1.8 -1.35,2.3 -1.15,2.3 -1.15,1.8 ; -0.85,1.8 -0.85,2.3 -0.65,2.3 -0.65,1.8 ; -0.35,1.8 -0.35,2.3 -0.15,2.3 -0.15,1.8 ; 0.15,1.8 0.15,2.3 0.35,2.3 0.35,1.8 ; 0.65,1.8 0.65,2.3 0.85,2.3 0.85,1.8 ; 1.15,1.8 1.15,2.3 1.35,2.3 1.35,1.8 ; 1.65,1.8 1.65,2.3 1.85,2.3 1.85,1.8 ; 2.15,1.8 2.15,2.3 2.35,2.3 2.35,1.8 ; 2.65,1.8 2.65,2.3 2.85,2.3 2.85,1.8 ; 3.15,1.8 3.15,2.3 3.35,2.3 3.35,1.8 ; 3.65,1.8 3.65,2.3 3.85,2.3 3.85,1.8 ; 4.15,1.8 4.15,2.3 4.35,2.3 4.35,1.8 ; 4.65,1.8 4.65,2.3 4.85,2.3 4.85,1.8 ; 5.15,1.8 5.15,2.3 5.35,2.3 5.35,1.8 ; 5.65,1.8 5.65,2.3 5.85,2.3 5.85,1.8 ; -7,-1.8 -7,1.8 7,1.8 7,-1.8 -7,-1.8
Top Designator:
  text ".Designator" at -3.647,-0.357 h1
Top 3D Body:
  lines w0.1: -5.85,1.8 -5.85,2.3 -5.65,2.3 -5.65,1.8 ; -5.35,1.8 -5.35,2.3 -5.15,2.3 -5.15,1.8 ; -4.85,1.8 -4.85,2.3 -4.65,2.3 -4.65,1.8 ; -4.35,1.8 -4.35,2.3 -4.15,2.3 -4.15,1.8 ; -3.85,1.8 -3.85,2.3 -3.65,2.3 -3.65,1.8 ; -3.35,1.8 -3.35,2.3 -3.15,2.3 -3.15,1.8 ; -2.85,1.8 -2.85,2.3 -2.65,2.3 -2.65,1.8 ; -2.35,1.8 -2.35,2.3 -2.15,2.3 -2.15,1.8 ; -1.85,1.8 -1.85,2.3 -1.65,2.3 -1.65,1.8 ; -1.35,1.8 -1.35,2.3 -1.15,2.3 -1.15,1.8 ; -0.85,1.8 -0.85,2.3 -0.65,2.3 -0.65,1.8 ; -0.35,1.8 -0.35,2.3 -0.15,2.3 -0.15,1.8 ; 0.15,1.8 0.15,2.3 0.35,2.3 0.35,1.8 ; 0.65,1.8 0.65,2.3 0.85,2.3 0.85,1.8 ; 1.15,1.8 1.15,2.3 1.35,2.3 1.35,1.8 ; 1.65,1.8 1.65,2.3 1.85,2.3 1.85,1.8 ; 2.15,1.8 2.15,2.3 2.35,2.3 2.35,1.8 ; 2.65,1.8 2.65,2.3 2.85,2.3 2.85,1.8 ; 3.15,1.8 3.15,2.3 3.35,2.3 3.35,1.8 ; 3.65,1.8 3.65,2.3 3.85,2.3 3.85,1.8 ; 4.15,1.8 4.15,2.3 4.35,2.3 4.35,1.8 ; 4.65,1.8 4.65,2.3 4.85,2.3 4.85,1.8 ; 5.15,1.8 5.15,2.3 5.35,2.3 5.35,1.8 ; 5.65,1.8 5.65,2.3 5.85,2.3 5.85,1.8 ; -7,-1.8 7,-1.8 7,1.8 -7,1.8 -7,-1.8
Top Courtyard:
  lines w0.05: -7.2,-2 -7.2,2.65 7.2,2.65 7.2,-2 -7.2,-2
Top Component Center:
  lines w0.1: -0.5,0 0.5,0 ; 0,-0.5 0,0.5
3D body "687124188722.stp": height 1.2, standoff 0, extent -7,-1.8 7,2.3

## 687126149022 [mm] "0.50mm SMT ZIF Horizontal Hinge Type Bottom Contact, 26p"
height 2.3
pads (28):
  rect 0.3x1.3 smd: 1(-6.25,3.35) 2(-5.75,3.35) 3(-5.25,3.35) 4(-4.75,3.35) 5(-4.25,3.35) 6(-3.75,3.35) 7(-3.25,3.35) 8(-2.75,3.35) 9(-2.25,3.35) 10(-1.75,3.35) 11(-1.25,3.35) 12(-0.75,3.35) 13(-0.25,3.35) 14(0.25,3.35) 15(0.75,3.35) 16(1.25,3.35) 17(1.75,3.35) 18(2.25,3.35) 19(2.75,3.35) 20(3.25,3.35) 21(3.75,3.35) 22(4.25,3.35) 23(4.75,3.35) 24(5.25,3.35) 25(5.75,3.35) 26(6.25,3.35)
  rect 2x1.8 smd: M1(-8.05,0.6) M2(8.05,0.6)
Top Overlay:
  circle w0.25: c-7.05,3.55 r0.125
  lines w0.2: -8.625,-0.625 -8.625,-2.975 8.625,-2.975 8.625,-0.625 ; -8.625,1.825 -8.625,2.975 -6.725,2.975 ; 6.725,2.975 8.625,2.975 8.625,1.825
Top Assembly:
  lines w0.1: -6.35,2.9 -6.35,3.6 -6.15,3.6 -6.15,2.9 ; -5.85,2.9 -5.85,3.6 -5.65,3.6 -5.65,2.9 ; -5.35,2.9 -5.35,3.6 -5.15,3.6 -5.15,2.9 ; -4.85,2.9 -4.85,3.6 -4.65,3.6 -4.65,2.9 ; -4.35,2.9 -4.35,3.6 -4.15,3.6 -4.15,2.9 ; -3.85,2.9 -3.85,3.6 -3.65,3.6 -3.65,2.9 ; -3.35,2.9 -3.35,3.6 -3.15,3.6 -3.15,2.9 ; -2.85,2.9 -2.85,3.6 -2.65,3.6 -2.65,2.9 ; -2.35,2.9 -2.35,3.6 -2.15,3.6 -2.15,2.9 ; -1.85,2.9 -1.85,3.6 -1.65,3.6 -1.65,2.9 ; -1.35,2.9 -1.35,3.6 -1.15,3.6 -1.15,2.9 ; -0.85,2.9 -0.85,3.6 -0.65,3.6 -0.65,2.9 ; -0.35,2.9 -0.35,3.6 -0.15,3.6 -0.15,2.9 ; 0.15,2.9 0.15,3.6 0.35,3.6 0.35,2.9 ; 0.65,2.9 0.65,3.6 0.85,3.6 0.85,2.9 ; 1.15,2.9 1.15,3.6 1.35,3.6 1.35,2.9 ; 1.65,2.9 1.65,3.6 1.85,3.6 1.85,2.9 ; 2.15,2.9 2.15,3.6 2.35,3.6 2.35,2.9 ; 2.65,2.9 2.65,3.6 2.85,3.6 2.85,2.9 ; 3.15,2.9 3.15,3.6 3.35,3.6 3.35,2.9 ; 3.65,2.9 3.65,3.6 3.85,3.6 3.85,2.9 ; 4.15,2.9 4.15,3.6 4.35,3.6 4.35,2.9 ; 4.65,2.9 4.65,3.6 4.85,3.6 4.85,2.9 ; 5.15,2.9 5.15,3.6 5.35,3.6 5.35,2.9 ; 5.65,2.9 5.65,3.6 5.85,3.6 5.85,2.9 ; 6.15,2.9 6.15,3.6 6.35,3.6 6.35,2.9 ; -8.55,-2.9 -8.55,2.9 8.55,2.9 8.55,-2.9 -8.55,-2.9
Top Designator:
  text ".Designator" at -3.647,-0.357 h1
Top 3D Body:
  lines w0.1: -6.35,2.9 -6.35,3.6 -6.15,3.6 -6.15,2.9 ; -5.85,2.9 -5.85,3.6 -5.65,3.6 -5.65,2.9 ; -5.35,2.9 -5.35,3.6 -5.15,3.6 -5.15,2.9 ; -4.85,2.9 -4.85,3.6 -4.65,3.6 -4.65,2.9 ; -4.35,2.9 -4.35,3.6 -4.15,3.6 -4.15,2.9 ; -3.85,2.9 -3.85,3.6 -3.65,3.6 -3.65,2.9 ; -3.35,2.9 -3.35,3.6 -3.15,3.6 -3.15,2.9 ; -2.85,2.9 -2.85,3.6 -2.65,3.6 -2.65,2.9 ; -2.35,2.9 -2.35,3.6 -2.15,3.6 -2.15,2.9 ; -1.85,2.9 -1.85,3.6 -1.65,3.6 -1.65,2.9 ; -1.35,2.9 -1.35,3.6 -1.15,3.6 -1.15,2.9 ; -0.85,2.9 -0.85,3.6 -0.65,3.6 -0.65,2.9 ; -0.35,2.9 -0.35,3.6 -0.15,3.6 -0.15,2.9 ; 0.15,2.9 0.15,3.6 0.35,3.6 0.35,2.9 ; 0.65,2.9 0.65,3.6 0.85,3.6 0.85,2.9 ; 1.15,2.9 1.15,3.6 1.35,3.6 1.35,2.9 ; 1.65,2.9 1.65,3.6 1.85,3.6 1.85,2.9 ; 2.15,2.9 2.15,3.6 2.35,3.6 2.35,2.9 ; 2.65,2.9 2.65,3.6 2.85,3.6 2.85,2.9 ; 3.15,2.9 3.15,3.6 3.35,3.6 3.35,2.9 ; 3.65,2.9 3.65,3.6 3.85,3.6 3.85,2.9 ; 4.15,2.9 4.15,3.6 4.35,3.6 4.35,2.9 ; 4.65,2.9 4.65,3.6 4.85,3.6 4.85,2.9 ; 5.15,2.9 5.15,3.6 5.35,3.6 5.35,2.9 ; 5.65,2.9 5.65,3.6 5.85,3.6 5.85,2.9 ; 6.15,2.9 6.15,3.6 6.35,3.6 6.35,2.9 ; -8.55,-2.9 8.55,-2.9 8.55,2.9 -8.55,2.9 -8.55,-2.9
Top Courtyard:
  lines w0.05: -9.25,-3.175 -9.25,4.2 9.25,4.2 9.25,-3.175 -9.25,-3.175
Top Component Center:
  lines w0.1: -0.5,0 0.5,0 ; 0,-0.5 0,0.5
3D body "687126149022.stp": height 2.25, standoff 0, extent -8.55,-2.9 8.55,3.6

## 687126182122 [mm] "ZIF Connectors, Horizontal, Dual Contact Back Locking, pitch 0.5mm, 26p"
height 1.06
pads (28):
  rect 0.3x0.8 smd: 1(-6.25,1.1) 2(-5.75,1.1) 3(-5.25,1.1) 4(-4.75,1.1) 5(-4.25,1.1) 6(-3.75,1.1) 7(-3.25,1.1) 8(-2.75,1.1) 9(-2.25,1.1) 10(-1.75,1.1) 11(-1.25,1.1) 12(-0.75,1.1) 13(-0.25,1.1) 14(0.25,1.1) 15(0.75,1.1) 16(1.25,1.1) 17(1.75,1.1) 18(2.25,1.1) 19(2.75,1.1) 20(3.25,1.1) 21(3.75,1.1) 22(4.25,1.1) 23(4.75,1.1) 24(5.25,1.1) 25(5.75,1.1) 26(6.25,1.1)
  rect 0.4x0.8 smd: M1(-7.25,-1.4) M2(7.25,-1.4)
Top Overlay:
  circle w0.15: c-6.3,2.3 r0.075
  lines w0.2: -7.575,-0.7 -7.575,1.05 -6.8,1.05 -6.8,1.425 -7.25,1.425 -7.25,1.925 7.25,1.925 7.25,1.425 6.8,1.425 6.8,1.05 7.575,1.05 7.575,-0.7 ; -6.75,-1.925 6.75,-1.925
Top Assembly:
  lines w0.1: -7.5,-1.15 -7.3,-1.15 -7.3,-1.85 7.3,-1.85 7.3,-1.15 7.5,-1.15 7.5,1.05 6.8,1.05 6.8,1.35 7.25,1.35 7.25,1.85 -7.25,1.85 -7.25,1.35 -6.8,1.35 -6.8,1.05 -7.5,1.05 -7.5,-1.15
Top Designator:
  text ".Designator" at -3.647,-0.357 h1
Top 3D Body:
  lines w0.1: -7.5,-1.15 -7.5,1.05 -6.8,1.05 -6.8,1.35 -7.25,1.35 -7.25,1.85 7.25,1.85 7.25,1.35 6.8,1.35 6.8,1.05 7.5,1.05 7.5,-1.15 7.3,-1.15 7.3,-1.85 -7.3,-1.85 -7.3,-1.15 -7.5,-1.15
Top Courtyard:
  lines w0.05: -7.775,-2.125 7.775,-2.125 7.775,2.125 -7.775,2.125 -7.775,-2.125
Top Component Center:
  lines w0.1: -0.5,0 0.5,0 ; 0,-0.5 0,0.5
3D body "687126182122.stp": height 0.98, standoff -0.01, extent -7.5,-1.85 7.5,1.85

## 687126183622 [mm] "ZIF Connectors, Horizontal, Top Contact Low Profile, pitch 0.5mm, 26p"
height 1.3
pads (28):
  rect 0.3x1 smd: 1(-6.25,2.3) 2(-5.75,2.3) 3(-5.25,2.3) 4(-4.75,2.3) 5(-4.25,2.3) 6(-3.75,2.3) 7(-3.25,2.3) 8(-2.75,2.3) 9(-2.25,2.3) 10(-1.75,2.3) 11(-1.25,2.3) 12(-0.75,2.3) 13(-0.25,2.3) 14(0.25,2.3) 15(0.75,2.3) 16(1.25,2.3) 17(1.75,2.3) 18(2.25,2.3) 19(2.75,2.3) 20(3.25,2.3) 21(3.75,2.3) 22(4.25,2.3) 23(4.75,2.3) 24(5.25,2.3) 25(5.75,2.3) 26(6.25,2.3)
  rect 1.65x1.3 smd: M1(-8.525,0.4) M2(8.525,0.4)
Top Overlay:
  circle w0.25: c-7,2.6 r0.125
  lines w0.2: -8.65,-0.55 -8.65,-1 -9.425,-1 -9.425,-1.95 9.425,-1.95 9.425,-1 8.65,-1 8.65,-0.55 ; -8.65,1.35 -8.65,1.95 -6.7,1.95 ; 6.7,1.95 8.65,1.95 8.65,1.35
Top Assembly:
  lines w0.1: -6.35,1.9 -6.35,2.35 -6.15,2.35 -6.15,1.9 ; -5.85,1.9 -5.85,2.35 -5.65,2.35 -5.65,1.9 ; -5.35,1.9 -5.35,2.35 -5.15,2.35 -5.15,1.9 ; -4.85,1.9 -4.85,2.35 -4.65,2.35 -4.65,1.9 ; -4.35,1.9 -4.35,2.35 -4.15,2.35 -4.15,1.9 ; -3.85,1.9 -3.85,2.35 -3.65,2.35 -3.65,1.9 ; -3.35,1.9 -3.35,2.35 -3.15,2.35 -3.15,1.9 ; -2.85,1.9 -2.85,2.35 -2.65,2.35 -2.65,1.9 ; -2.35,1.9 -2.35,2.35 -2.15,2.35 -2.15,1.9 ; -1.85,1.9 -1.85,2.35 -1.65,2.35 -1.65,1.9 ; -1.35,1.9 -1.35,2.35 -1.15,2.35 -1.15,1.9 ; -0.85,1.9 -0.85,2.35 -0.65,2.35 -0.65,1.9 ; -0.35,1.9 -0.35,2.35 -0.15,2.35 -0.15,1.9 ; 0.15,1.9 0.15,2.35 0.35,2.35 0.35,1.9 ; 0.65,1.9 0.65,2.35 0.85,2.35 0.85,1.9 ; 1.15,1.9 1.15,2.35 1.35,2.35 1.35,1.9 ; 1.65,1.9 1.65,2.35 1.85,2.35 1.85,1.9 ; 2.15,1.9 2.15,2.35 2.35,2.35 2.35,1.9 ; 2.65,1.9 2.65,2.35 2.85,2.35 2.85,1.9 ; 3.15,1.9 3.15,2.35 3.35,2.35 3.35,1.9 ; 3.65,1.9 3.65,2.35 3.85,2.35 3.85,1.9 ; 4.15,1.9 4.15,2.35 4.35,2.35 4.35,1.9 ; 4.65,1.9 4.65,2.35 4.85,2.35 4.85,1.9 ; 5.15,1.9 5.15,2.35 5.35,2.35 5.35,1.9 ; 5.65,1.9 5.65,2.35 5.85,2.35 5.85,1.9 ; 6.15,1.9 6.15,2.35 6.35,2.35 6.35,1.9 ; -9.35,-1.9 9.35,-1.9 9.35,-1 8.65,-1 8.65,1.9 -8.65,1.9 -8.65,-1 -9.35,-1 -9.35,-1.9
Top Designator:
  text ".Designator" at -3.647,-0.357 h1
Top 3D Body:
  lines w0.1: -6.35,1.9 -6.35,2.35 -6.15,2.35 -6.15,1.9 ; -5.85,1.9 -5.85,2.35 -5.65,2.35 -5.65,1.9 ; -5.35,1.9 -5.35,2.35 -5.15,2.35 -5.15,1.9 ; -4.85,1.9 -4.85,2.35 -4.65,2.35 -4.65,1.9 ; -4.35,1.9 -4.35,2.35 -4.15,2.35 -4.15,1.9 ; -3.85,1.9 -3.85,2.35 -3.65,2.35 -3.65,1.9 ; -3.35,1.9 -3.35,2.35 -3.15,2.35 -3.15,1.9 ; -2.85,1.9 -2.85,2.35 -2.65,2.35 -2.65,1.9 ; -2.35,1.9 -2.35,2.35 -2.15,2.35 -2.15,1.9 ; -1.85,1.9 -1.85,2.35 -1.65,2.35 -1.65,1.9 ; -1.35,1.9 -1.35,2.35 -1.15,2.35 -1.15,1.9 ; -0.85,1.9 -0.85,2.35 -0.65,2.35 -0.65,1.9 ; -0.35,1.9 -0.35,2.35 -0.15,2.35 -0.15,1.9 ; 0.15,1.9 0.15,2.35 0.35,2.35 0.35,1.9 ; 0.65,1.9 0.65,2.35 0.85,2.35 0.85,1.9 ; 1.15,1.9 1.15,2.35 1.35,2.35 1.35,1.9 ; 1.65,1.9 1.65,2.35 1.85,2.35 1.85,1.9 ; 2.15,1.9 2.15,2.35 2.35,2.35 2.35,1.9 ; 2.65,1.9 2.65,2.35 2.85,2.35 2.85,1.9 ; 3.15,1.9 3.15,2.35 3.35,2.35 3.35,1.9 ; 3.65,1.9 3.65,2.35 3.85,2.35 3.85,1.9 ; 4.15,1.9 4.15,2.35 4.35,2.35 4.35,1.9 ; 4.65,1.9 4.65,2.35 4.85,2.35 4.85,1.9 ; 5.15,1.9 5.15,2.35 5.35,2.35 5.35,1.9 ; 5.65,1.9 5.65,2.35 5.85,2.35 5.85,1.9 ; 6.15,1.9 6.15,2.35 6.35,2.35 6.35,1.9 ; -9.35,-1.9 -9.35,-1 -8.65,-1 -8.65,1.9 8.65,1.9 8.65,-1 9.35,-1 9.35,-1.9 -9.35,-1.9
Top Courtyard:
  lines w0.05: -9.625,-2.15 9.625,-2.15 9.625,3 -9.625,3 -9.625,-2.15
Top Component Center:
  lines w0.1: -0.5,0 0.5,0 ; 0,-0.5 0,0.5
3D body "687126183622.stp": height 1.28, standoff -0.01, extent -9.35,-1.9 9.35,2.35

## 687126183722 [mm] "ZIF Connectors, Horizontal, Bottom Contact Low Profile, pitch 0.5mm, 26p"
height 1.3
pads (28):
  rect 0.3x1 smd: 1(-6.25,2.3) 2(-5.75,2.3) 3(-5.25,2.3) 4(-4.75,2.3) 5(-4.25,2.3) 6(-3.75,2.3) 7(-3.25,2.3) 8(-2.75,2.3) 9(-2.25,2.3) 10(-1.75,2.3) 11(-1.25,2.3) 12(-0.75,2.3) 13(-0.25,2.3) 14(0.25,2.3) 15(0.75,2.3) 16(1.25,2.3) 17(1.75,2.3) 18(2.25,2.3) 19(2.75,2.3) 20(3.25,2.3) 21(3.75,2.3) 22(4.25,2.3) 23(4.75,2.3) 24(5.25,2.3) 25(5.75,2.3) 26(6.25,2.3)
  rect 1.65x1.3 smd: M1(-8.525,0.4) M2(8.525,0.4)
Top Overlay:
  circle w0.25: c-6.95,2.5 r0.125
  lines w0.2: -8.725,-0.55 -8.725,-1 -9.425,-1 -9.425,-1.95 9.425,-1.95 9.425,-1 8.725,-1 8.725,-0.55 ; -8.725,1.35 -8.725,1.95 -6.725,1.95 ; 6.725,1.95 8.725,1.95 8.725,1.35
Top Assembly:
  lines w0.1: -6.35,1.9 -6.35,2.35 -6.15,2.35 -6.15,1.9 ; -5.85,1.9 -5.85,2.35 -5.65,2.35 -5.65,1.9 ; -5.35,1.9 -5.35,2.35 -5.15,2.35 -5.15,1.9 ; -4.85,1.9 -4.85,2.35 -4.65,2.35 -4.65,1.9 ; -4.35,1.9 -4.35,2.35 -4.15,2.35 -4.15,1.9 ; -3.85,1.9 -3.85,2.35 -3.65,2.35 -3.65,1.9 ; -3.35,1.9 -3.35,2.35 -3.15,2.35 -3.15,1.9 ; -2.85,1.9 -2.85,2.35 -2.65,2.35 -2.65,1.9 ; -2.35,1.9 -2.35,2.35 -2.15,2.35 -2.15,1.9 ; -1.85,1.9 -1.85,2.35 -1.65,2.35 -1.65,1.9 ; -1.35,1.9 -1.35,2.35 -1.15,2.35 -1.15,1.9 ; -0.85,1.9 -0.85,2.35 -0.65,2.35 -0.65,1.9 ; -0.35,1.9 -0.35,2.35 -0.15,2.35 -0.15,1.9 ; 0.15,1.9 0.15,2.35 0.35,2.35 0.35,1.9 ; 0.65,1.9 0.65,2.35 0.85,2.35 0.85,1.9 ; 1.15,1.9 1.15,2.35 1.35,2.35 1.35,1.9 ; 1.65,1.9 1.65,2.35 1.85,2.35 1.85,1.9 ; 2.15,1.9 2.15,2.35 2.35,2.35 2.35,1.9 ; 2.65,1.9 2.65,2.35 2.85,2.35 2.85,1.9 ; 3.15,1.9 3.15,2.35 3.35,2.35 3.35,1.9 ; 3.65,1.9 3.65,2.35 3.85,2.35 3.85,1.9 ; 4.15,1.9 4.15,2.35 4.35,2.35 4.35,1.9 ; 4.65,1.9 4.65,2.35 4.85,2.35 4.85,1.9 ; 5.15,1.9 5.15,2.35 5.35,2.35 5.35,1.9 ; 5.65,1.9 5.65,2.35 5.85,2.35 5.85,1.9 ; 6.15,1.9 6.15,2.35 6.35,2.35 6.35,1.9 ; -9.35,-1.9 -9.35,-1 -8.65,-1 -8.65,1.9 8.65,1.9 8.65,-1 9.35,-1 9.35,-1.9 -9.35,-1.9
Top Designator:
  text ".Designator" at -3.647,-0.357 h1
Top 3D Body:
  lines w0.1: -6.35,1.9 -6.35,2.35 -6.15,2.35 -6.15,1.9 ; -5.85,1.9 -5.85,2.35 -5.65,2.35 -5.65,1.9 ; -5.35,1.9 -5.35,2.35 -5.15,2.35 -5.15,1.9 ; -4.85,1.9 -4.85,2.35 -4.65,2.35 -4.65,1.9 ; -4.35,1.9 -4.35,2.35 -4.15,2.35 -4.15,1.9 ; -3.85,1.9 -3.85,2.35 -3.65,2.35 -3.65,1.9 ; -3.35,1.9 -3.35,2.35 -3.15,2.35 -3.15,1.9 ; -2.85,1.9 -2.85,2.35 -2.65,2.35 -2.65,1.9 ; -2.35,1.9 -2.35,2.35 -2.15,2.35 -2.15,1.9 ; -1.85,1.9 -1.85,2.35 -1.65,2.35 -1.65,1.9 ; -1.35,1.9 -1.35,2.35 -1.15,2.35 -1.15,1.9 ; -0.85,1.9 -0.85,2.35 -0.65,2.35 -0.65,1.9 ; -0.35,1.9 -0.35,2.35 -0.15,2.35 -0.15,1.9 ; 0.15,1.9 0.15,2.35 0.35,2.35 0.35,1.9 ; 0.65,1.9 0.65,2.35 0.85,2.35 0.85,1.9 ; 1.15,1.9 1.15,2.35 1.35,2.35 1.35,1.9 ; 1.65,1.9 1.65,2.35 1.85,2.35 1.85,1.9 ; 2.15,1.9 2.15,2.35 2.35,2.35 2.35,1.9 ; 2.65,1.9 2.65,2.35 2.85,2.35 2.85,1.9 ; 3.15,1.9 3.15,2.35 3.35,2.35 3.35,1.9 ; 3.65,1.9 3.65,2.35 3.85,2.35 3.85,1.9 ; 4.15,1.9 4.15,2.35 4.35,2.35 4.35,1.9 ; 4.65,1.9 4.65,2.35 4.85,2.35 4.85,1.9 ; 5.15,1.9 5.15,2.35 5.35,2.35 5.35,1.9 ; 5.65,1.9 5.65,2.35 5.85,2.35 5.85,1.9 ; 6.15,1.9 6.15,2.35 6.35,2.35 6.35,1.9 ; -9.35,-1.9 9.35,-1.9 9.35,-1 8.65,-1 8.65,1.9 -8.65,1.9 -8.65,-1 -9.35,-1 -9.35,-1.9
Top Courtyard:
  lines w0.05: -9.625,-2.15 -9.625,3 9.625,3 9.625,-2.15 -9.625,-2.15
Top Component Center:
  lines w0.1: -0.5,0 0.5,0 ; 0,-0.5 0,0.5
3D body "687126183722.stp": height 1.28, standoff -0.01, extent -9.35,-1.9 9.35,2.35

## 687128149022 [mm] "0.50mm SMT ZIF Horizontal Hinge Type Bottom Contact, 28p"
height 2.3
pads (30):
  rect 0.3x1.3 smd: 1(-6.75,3.35) 2(-6.25,3.35) 3(-5.75,3.35) 4(-5.25,3.35) 5(-4.75,3.35) 6(-4.25,3.35) 7(-3.75,3.35) 8(-3.25,3.35) 9(-2.75,3.35) 10(-2.25,3.35) 11(-1.75,3.35) 12(-1.25,3.35) 13(-0.75,3.35) 14(-0.25,3.35) 15(0.25,3.35) 16(0.75,3.35) 17(1.25,3.35) 18(1.75,3.35) 19(2.25,3.35) 20(2.75,3.35) 21(3.25,3.35) 22(3.75,3.35) 23(4.25,3.35) 24(4.75,3.35) 25(5.25,3.35) 26(5.75,3.35) 27(6.25,3.35) 28(6.75,3.35)
  rect 2x1.8 smd: M1(-8.55,0.6) M2(8.55,0.6)
Top Overlay:
  circle w0.25: c-7.55,3.55 r0.125
  lines w0.2: -9.125,-0.625 -9.125,-2.975 9.125,-2.975 9.125,-0.625 ; -9.125,1.825 -9.125,2.975 -7.225,2.975 ; 7.225,2.975 9.125,2.975 9.125,1.825
Top Assembly:
  lines w0.1: -6.85,2.9 -6.85,3.6 -6.65,3.6 -6.65,2.9 ; -6.35,2.9 -6.35,3.6 -6.15,3.6 -6.15,2.9 ; -5.85,2.9 -5.85,3.6 -5.65,3.6 -5.65,2.9 ; -5.35,2.9 -5.35,3.6 -5.15,3.6 -5.15,2.9 ; -4.85,2.9 -4.85,3.6 -4.65,3.6 -4.65,2.9 ; -4.35,2.9 -4.35,3.6 -4.15,3.6 -4.15,2.9 ; -3.85,2.9 -3.85,3.6 -3.65,3.6 -3.65,2.9 ; -3.35,2.9 -3.35,3.6 -3.15,3.6 -3.15,2.9 ; -2.85,2.9 -2.85,3.6 -2.65,3.6 -2.65,2.9 ; -2.35,2.9 -2.35,3.6 -2.15,3.6 -2.15,2.9 ; -1.85,2.9 -1.85,3.6 -1.65,3.6 -1.65,2.9 ; -1.35,2.9 -1.35,3.6 -1.15,3.6 -1.15,2.9 ; -0.85,2.9 -0.85,3.6 -0.65,3.6 -0.65,2.9 ; -0.35,2.9 -0.35,3.6 -0.15,3.6 -0.15,2.9 ; 0.15,2.9 0.15,3.6 0.35,3.6 0.35,2.9 ; 0.65,2.9 0.65,3.6 0.85,3.6 0.85,2.9 ; 1.15,2.9 1.15,3.6 1.35,3.6 1.35,2.9 ; 1.65,2.9 1.65,3.6 1.85,3.6 1.85,2.9 ; 2.15,2.9 2.15,3.6 2.35,3.6 2.35,2.9 ; 2.65,2.9 2.65,3.6 2.85,3.6 2.85,2.9 ; 3.15,2.9 3.15,3.6 3.35,3.6 3.35,2.9 ; 3.65,2.9 3.65,3.6 3.85,3.6 3.85,2.9 ; 4.15,2.9 4.15,3.6 4.35,3.6 4.35,2.9 ; 4.65,2.9 4.65,3.6 4.85,3.6 4.85,2.9 ; 5.15,2.9 5.15,3.6 5.35,3.6 5.35,2.9 ; 5.65,2.9 5.65,3.6 5.85,3.6 5.85,2.9 ; 6.15,2.9 6.15,3.6 6.35,3.6 6.35,2.9 ; 6.65,2.9 6.65,3.6 6.85,3.6 6.85,2.9 ; -9.05,-2.9 9.05,-2.9 9.05,2.9 -9.05,2.9 -9.05,-2.9
Top Designator:
  text ".Designator" at -3.647,-0.357 h1
Top 3D Body:
  lines w0.1: -6.85,2.9 -6.85,3.6 -6.65,3.6 -6.65,2.9 ; -6.35,2.9 -6.35,3.6 -6.15,3.6 -6.15,2.9 ; -5.85,2.9 -5.85,3.6 -5.65,3.6 -5.65,2.9 ; -5.35,2.9 -5.35,3.6 -5.15,3.6 -5.15,2.9 ; -4.85,2.9 -4.85,3.6 -4.65,3.6 -4.65,2.9 ; -4.35,2.9 -4.35,3.6 -4.15,3.6 -4.15,2.9 ; -3.85,2.9 -3.85,3.6 -3.65,3.6 -3.65,2.9 ; -3.35,2.9 -3.35,3.6 -3.15,3.6 -3.15,2.9 ; -2.85,2.9 -2.85,3.6 -2.65,3.6 -2.65,2.9 ; -2.35,2.9 -2.35,3.6 -2.15,3.6 -2.15,2.9 ; -1.85,2.9 -1.85,3.6 -1.65,3.6 -1.65,2.9 ; -1.35,2.9 -1.35,3.6 -1.15,3.6 -1.15,2.9 ; -0.85,2.9 -0.85,3.6 -0.65,3.6 -0.65,2.9 ; -0.35,2.9 -0.35,3.6 -0.15,3.6 -0.15,2.9 ; 0.15,2.9 0.15,3.6 0.35,3.6 0.35,2.9 ; 0.65,2.9 0.65,3.6 0.85,3.6 0.85,2.9 ; 1.15,2.9 1.15,3.6 1.35,3.6 1.35,2.9 ; 1.65,2.9 1.65,3.6 1.85,3.6 1.85,2.9 ; 2.15,2.9 2.15,3.6 2.35,3.6 2.35,2.9 ; 2.65,2.9 2.65,3.6 2.85,3.6 2.85,2.9 ; 3.15,2.9 3.15,3.6 3.35,3.6 3.35,2.9 ; 3.65,2.9 3.65,3.6 3.85,3.6 3.85,2.9 ; 4.15,2.9 4.15,3.6 4.35,3.6 4.35,2.9 ; 4.65,2.9 4.65,3.6 4.85,3.6 4.85,2.9 ; 5.15,2.9 5.15,3.6 5.35,3.6 5.35,2.9 ; 5.65,2.9 5.65,3.6 5.85,3.6 5.85,2.9 ; 6.15,2.9 6.15,3.6 6.35,3.6 6.35,2.9 ; 6.65,2.9 6.65,3.6 6.85,3.6 6.85,2.9 ; -9.05,-2.9 -9.05,2.9 9.05,2.9 9.05,-2.9 -9.05,-2.9
Top Courtyard:
  lines w0.05: -9.75,-3.175 9.75,-3.175 9.75,4.2 -9.75,4.2 -9.75,-3.175
Top Component Center:
  lines w0.1: -0.5,0 0.5,0 ; 0,-0.5 0,0.5
3D body "687128149022.stp": height 2.25, standoff 0, extent -9.05,-2.9 9.05,3.6

## 687128182122 [mm] "ZIF Connectors, Horizontal, Dual Contact Back Locking, pitch 0.5mm, 28p"
height 1.06
pads (30):
  rect 0.3x0.8 smd: 1(-6.75,1.1) 2(-6.25,1.1) 3(-5.75,1.1) 4(-5.25,1.1) 5(-4.75,1.1) 6(-4.25,1.1) 7(-3.75,1.1) 8(-3.25,1.1) 9(-2.75,1.1) 10(-2.25,1.1) 11(-1.75,1.1) 12(-1.25,1.1) 13(-0.75,1.1) 14(-0.25,1.1) 15(0.25,1.1) 16(0.75,1.1) 17(1.25,1.1) 18(1.75,1.1) 19(2.25,1.1) 20(2.75,1.1) 21(3.25,1.1) 22(3.75,1.1) 23(4.25,1.1) 24(4.75,1.1) 25(5.25,1.1) 26(5.75,1.1) 27(6.25,1.1) 28(6.75,1.1)
  rect 0.4x0.8 smd: M1(-7.75,-1.4) M2(7.75,-1.4)
Top Overlay:
  circle w0.15: c-6.8,2.3 r0.075
  lines w0.2: -8.075,-0.7 -8.075,1.05 -7.3,1.05 -7.3,1.425 -7.75,1.425 -7.75,1.925 7.75,1.925 7.75,1.425 7.3,1.425 7.3,1.05 8.075,1.05 8.075,-0.7 ; -7.25,-1.925 7.25,-1.925
Top Assembly:
  lines w0.1: -8,-1.15 -8,1.05 -7.3,1.05 -7.3,1.35 -7.75,1.35 -7.75,1.85 7.75,1.85 7.75,1.35 7.3,1.35 7.3,1.05 8,1.05 8,-1.15 7.8,-1.15 7.8,-1.85 -7.8,-1.85 -7.8,-1.15 -8,-1.15
Top Designator:
  text ".Designator" at -3.647,-0.357 h1
Top 3D Body:
  lines w0.1: -8,-1.15 -7.8,-1.15 -7.8,-1.85 7.8,-1.85 7.8,-1.15 8,-1.15 8,1.05 7.3,1.05 7.3,1.35 7.75,1.35 7.75,1.85 -7.75,1.85 -7.75,1.35 -7.3,1.35 -7.3,1.05 -8,1.05 -8,-1.15
Top Courtyard:
  lines w0.05: -8.275,-2.125 -8.275,2.125 8.275,2.125 8.275,-2.125 -8.275,-2.125
Top Component Center:
  lines w0.1: -0.5,0 0.5,0 ; 0,-0.5 0,0.5
3D body "687128182122.stp": height 0.98, standoff -0.01, extent -8,-1.85 8,1.85

## 687128183622 [mm] "ZIF Connectors, Horizontal, Top Contact Low Profile, pitch 0.5mm, 28p"
height 1.3
pads (30):
  rect 0.3x1 smd: 1(-6.75,2.3) 2(-6.25,2.3) 3(-5.75,2.3) 4(-5.25,2.3) 5(-4.75,2.3) 6(-4.25,2.3) 7(-3.75,2.3) 8(-3.25,2.3) 9(-2.75,2.3) 10(-2.25,2.3) 11(-1.75,2.3) 12(-1.25,2.3) 13(-0.75,2.3) 14(-0.25,2.3) 15(0.25,2.3) 16(0.75,2.3) 17(1.25,2.3) 18(1.75,2.3) 19(2.25,2.3) 20(2.75,2.3) 21(3.25,2.3) 22(3.75,2.3) 23(4.25,2.3) 24(4.75,2.3) 25(5.25,2.3) 26(5.75,2.3) 27(6.25,2.3) 28(6.75,2.3)
  rect 1.65x1.3 smd: M1(-9.025,0.4) M2(9.025,0.4)
Top Overlay:
  circle w0.25: c-7.5,2.6 r0.125
  lines w0.2: -9.15,-0.55 -9.15,-1 -9.925,-1 -9.925,-1.95 9.925,-1.95 9.925,-1 9.15,-1 9.15,-0.55 ; -9.15,1.35 -9.15,1.95 -7.2,1.95 ; 7.2,1.95 9.15,1.95 9.15,1.35
Top Assembly:
  lines w0.1: -6.85,1.9 -6.85,2.35 -6.65,2.35 -6.65,1.9 ; -6.35,1.9 -6.35,2.35 -6.15,2.35 -6.15,1.9 ; -5.85,1.9 -5.85,2.35 -5.65,2.35 -5.65,1.9 ; -5.35,1.9 -5.35,2.35 -5.15,2.35 -5.15,1.9 ; -4.85,1.9 -4.85,2.35 -4.65,2.35 -4.65,1.9 ; -4.35,1.9 -4.35,2.35 -4.15,2.35 -4.15,1.9 ; -3.85,1.9 -3.85,2.35 -3.65,2.35 -3.65,1.9 ; -3.35,1.9 -3.35,2.35 -3.15,2.35 -3.15,1.9 ; -2.85,1.9 -2.85,2.35 -2.65,2.35 -2.65,1.9 ; -2.35,1.9 -2.35,2.35 -2.15,2.35 -2.15,1.9 ; -1.85,1.9 -1.85,2.35 -1.65,2.35 -1.65,1.9 ; -1.35,1.9 -1.35,2.35 -1.15,2.35 -1.15,1.9 ; -0.85,1.9 -0.85,2.35 -0.65,2.35 -0.65,1.9 ; -0.35,1.9 -0.35,2.35 -0.15,2.35 -0.15,1.9 ; 0.15,1.9 0.15,2.35 0.35,2.35 0.35,1.9 ; 0.65,1.9 0.65,2.35 0.85,2.35 0.85,1.9 ; 1.15,1.9 1.15,2.35 1.35,2.35 1.35,1.9 ; 1.65,1.9 1.65,2.35 1.85,2.35 1.85,1.9 ; 2.15,1.9 2.15,2.35 2.35,2.35 2.35,1.9 ; 2.65,1.9 2.65,2.35 2.85,2.35 2.85,1.9 ; 3.15,1.9 3.15,2.35 3.35,2.35 3.35,1.9 ; 3.65,1.9 3.65,2.35 3.85,2.35 3.85,1.9 ; 4.15,1.9 4.15,2.35 4.35,2.35 4.35,1.9 ; 4.65,1.9 4.65,2.35 4.85,2.35 4.85,1.9 ; 5.15,1.9 5.15,2.35 5.35,2.35 5.35,1.9 ; 5.65,1.9 5.65,2.35 5.85,2.35 5.85,1.9 ; 6.15,1.9 6.15,2.35 6.35,2.35 6.35,1.9 ; 6.65,1.9 6.65,2.35 6.85,2.35 6.85,1.9 ; -9.85,-1.9 -9.85,-1 -9.15,-1 -9.15,1.9 9.15,1.9 9.15,-1 9.85,-1 9.85,-1.9 -9.85,-1.9
Top Designator:
  text ".Designator" at -3.647,-0.357 h1
Top 3D Body:
  lines w0.1: -6.85,1.9 -6.85,2.35 -6.65,2.35 -6.65,1.9 ; -6.35,1.9 -6.35,2.35 -6.15,2.35 -6.15,1.9 ; -5.85,1.9 -5.85,2.35 -5.65,2.35 -5.65,1.9 ; -5.35,1.9 -5.35,2.35 -5.15,2.35 -5.15,1.9 ; -4.85,1.9 -4.85,2.35 -4.65,2.35 -4.65,1.9 ; -4.35,1.9 -4.35,2.35 -4.15,2.35 -4.15,1.9 ; -3.85,1.9 -3.85,2.35 -3.65,2.35 -3.65,1.9 ; -3.35,1.9 -3.35,2.35 -3.15,2.35 -3.15,1.9 ; -2.85,1.9 -2.85,2.35 -2.65,2.35 -2.65,1.9 ; -2.35,1.9 -2.35,2.35 -2.15,2.35 -2.15,1.9 ; -1.85,1.9 -1.85,2.35 -1.65,2.35 -1.65,1.9 ; -1.35,1.9 -1.35,2.35 -1.15,2.35 -1.15,1.9 ; -0.85,1.9 -0.85,2.35 -0.65,2.35 -0.65,1.9 ; -0.35,1.9 -0.35,2.35 -0.15,2.35 -0.15,1.9 ; 0.15,1.9 0.15,2.35 0.35,2.35 0.35,1.9 ; 0.65,1.9 0.65,2.35 0.85,2.35 0.85,1.9 ; 1.15,1.9 1.15,2.35 1.35,2.35 1.35,1.9 ; 1.65,1.9 1.65,2.35 1.85,2.35 1.85,1.9 ; 2.15,1.9 2.15,2.35 2.35,2.35 2.35,1.9 ; 2.65,1.9 2.65,2.35 2.85,2.35 2.85,1.9 ; 3.15,1.9 3.15,2.35 3.35,2.35 3.35,1.9 ; 3.65,1.9 3.65,2.35 3.85,2.35 3.85,1.9 ; 4.15,1.9 4.15,2.35 4.35,2.35 4.35,1.9 ; 4.65,1.9 4.65,2.35 4.85,2.35 4.85,1.9 ; 5.15,1.9 5.15,2.35 5.35,2.35 5.35,1.9 ; 5.65,1.9 5.65,2.35 5.85,2.35 5.85,1.9 ; 6.15,1.9 6.15,2.35 6.35,2.35 6.35,1.9 ; 6.65,1.9 6.65,2.35 6.85,2.35 6.85,1.9 ; -9.85,-1.9 9.85,-1.9 9.85,-1 9.15,-1 9.15,1.9 -9.15,1.9 -9.15,-1 -9.85,-1 -9.85,-1.9
Top Courtyard:
  lines w0.05: -10.125,-2.15 -10.125,3 10.125,3 10.125,-2.15 -10.125,-2.15
Top Component Center:
  lines w0.1: -0.5,0 0.5,0 ; 0,-0.5 0,0.5
3D body "687128183622.stp": height 1.28, standoff -0.01, extent -9.85,-1.9 9.85,2.35